# Altium footprint library BA2032SM.PCBLIB: 1 footprints
Each footprint in its own frame and in the unit in brackets; x right, y up, seen from the top. Pads: shape width x height; smd on the part's side, far side on the other; paste and mask are expansions set on the pad; w line width, h text height; cw(c..) or ccw(c..) is an arc to the next point about the centre after c.
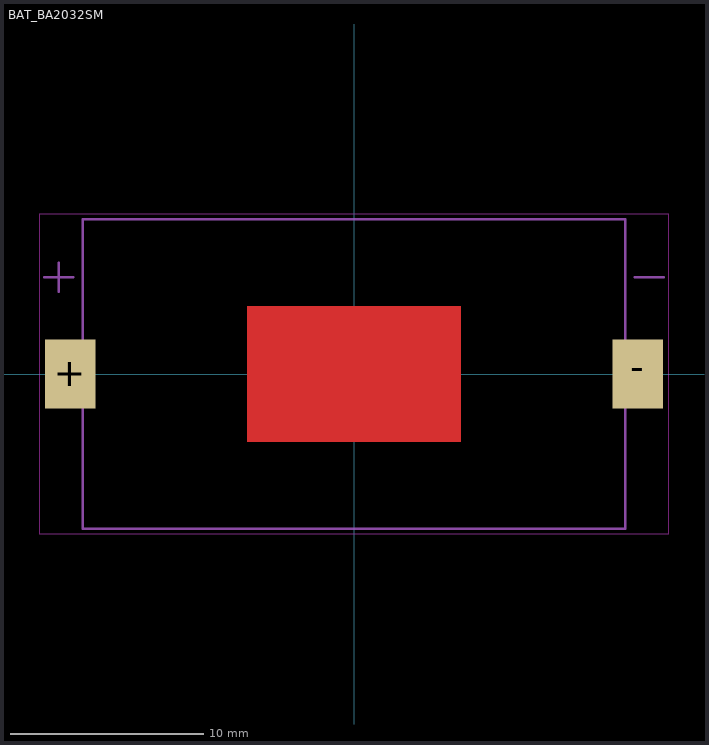
[diagram p0: the footprint, top view; thin cyan lines are the x and y axes]

## BAT_BA2032SM [mm]
pads (2):
  rect 2.6x3.56 smd: +(-14.65,0) -(14.65,0)
Top:
  region: -5.5,3.5 5.5,3.5 5.5,-3.5 -5.5,-3.5
Top keep-out:
  lines w0.05: -16.25,-8.25 -16.25,8.25 16.25,8.25 16.25,-8.25 -16.25,-8.25
Top Solder:
  region: -5.6,3.6 5.6,3.6 5.6,-3.6 -5.6,-3.6
tDocu:
  lines w0.127: -16,5 -14.5,5 ; -15.25,4.25 -15.25,5.75 ; 14.5,5 16,5 ; -14,-8 -14,8 14,8 14,-8 -14,-8
tPlace:
  lines w0.127: -16,5 -14.5,5 ; -15.25,4.25 -15.25,5.75 ; -14,-3 -14,-8 14,-8 14,-3 ; -14,3 -14,8 14,8 14,3